# Altium footprint library KLS7-TS3608.PcbLib: 1 footprints
Each footprint in its own frame and in the unit in brackets; x right, y up, seen from the top. Pads: shape width x height; smd on the part's side, far side on the other; paste and mask are expansions set on the pad; w line width, h text height; cw(c..) or ccw(c..) is an arc to the next point about the centre after c.
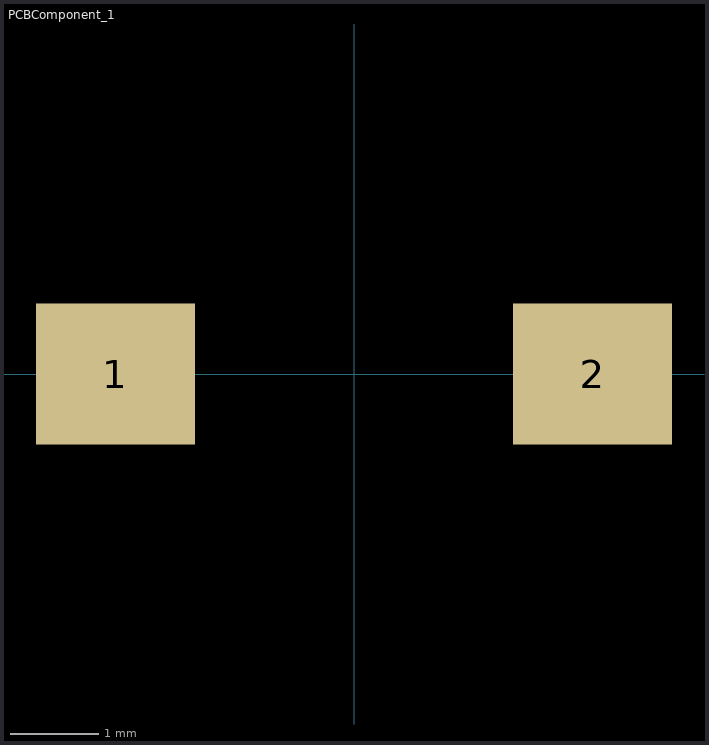
[diagram p0: the footprint, top view; thin cyan lines are the x and y axes]

## PCBComponent_1 [mm]
pads (2):
  rect 1.8x1.6 smd: 1(-2.7,0) 2(2.7,0)
3D body "KLS7-TS3608-5.0-180_TD-02XA.step": height 5, standoff 0, extent -3.6,-1.75 3.6,1.75